# Altium footprint library CustomCase.PcbLib: 411 footprints (part 14 of 26)
Each footprint in its own frame and in the unit in brackets; x right, y up, seen from the top. Pads: shape width x height; smd on the part's side, far side on the other; paste and mask are expansions set on the pad; w line width, h text height; cw(c..) or ccw(c..) is an arc to the next point about the centre after c.
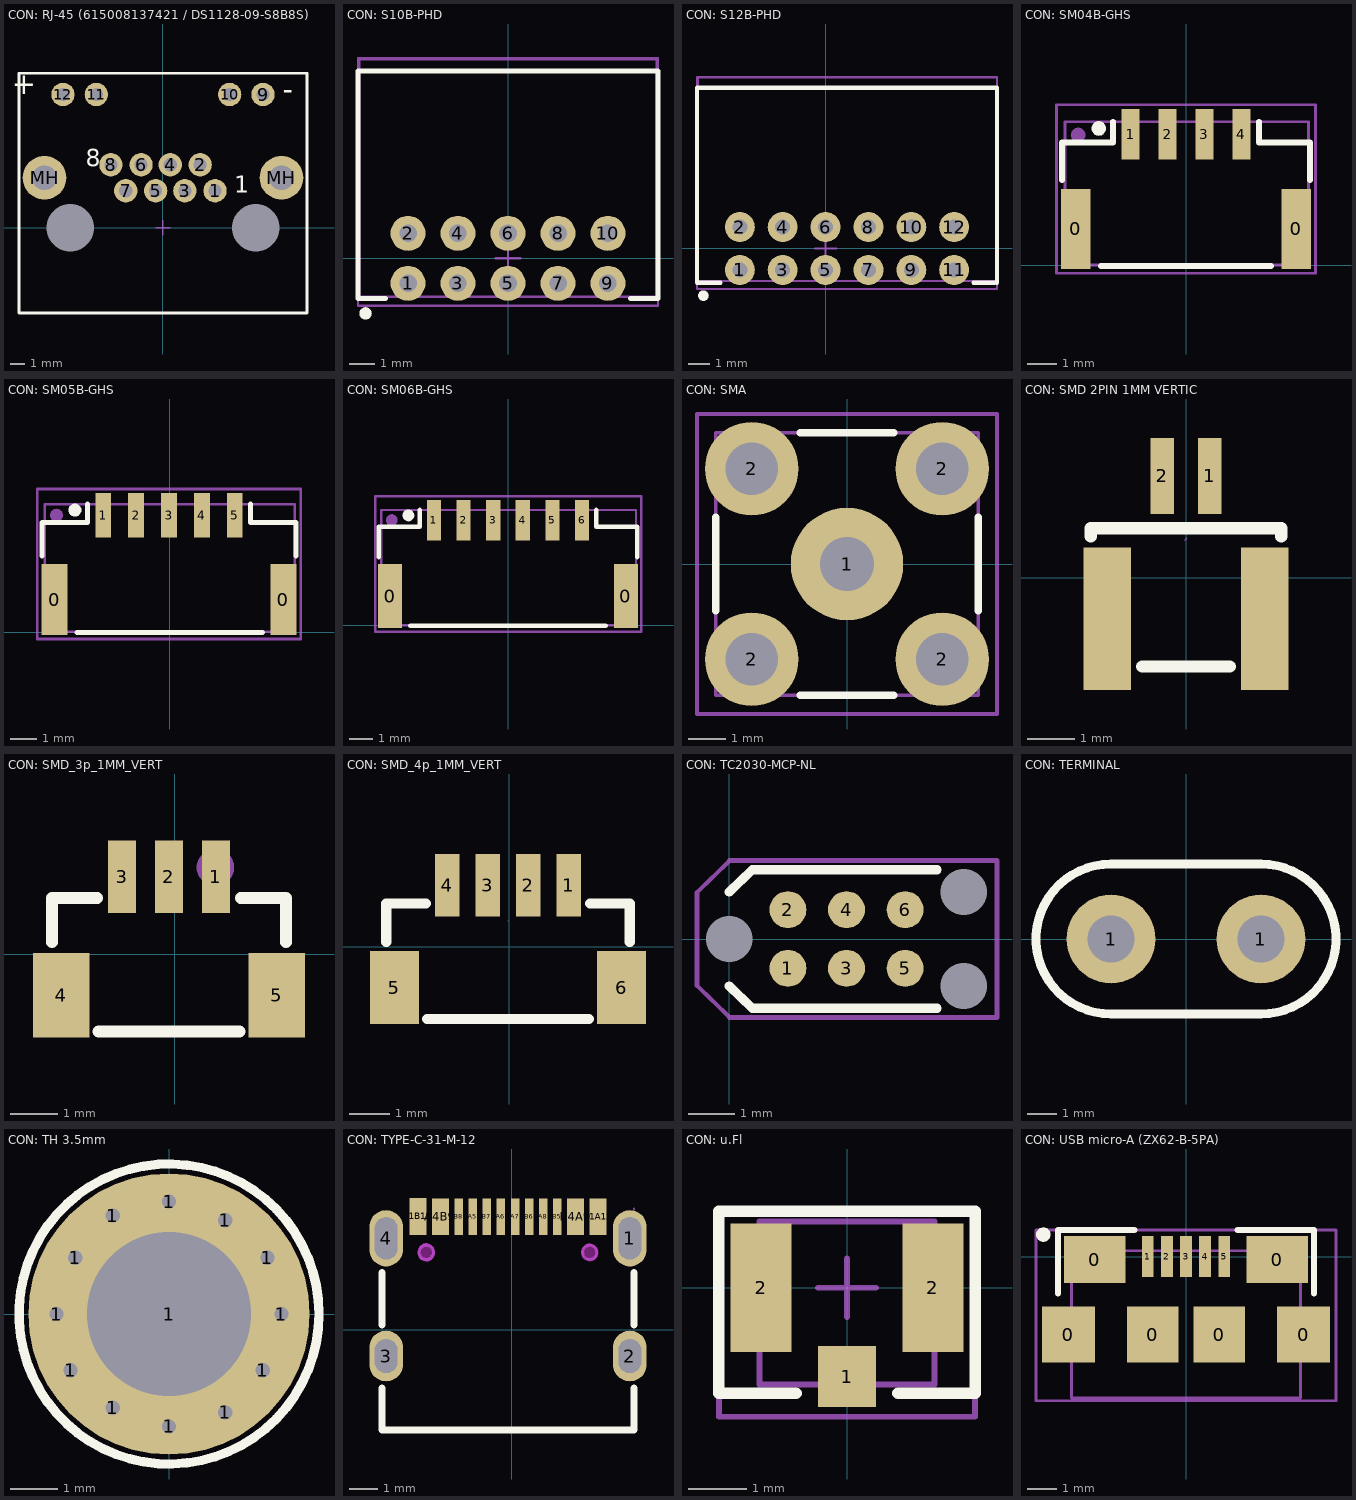
[diagram p13: the footprints below, top view; thin cyan lines are the x and y axes]

## CON: RJ-45 (615008137421 / DS1128-09-S8B8S) [mm]
pads (16):
  round 1.6 hole 0.9: 1(3.57,2.54) 2(2.55,4.32) 3(1.503,2.54) 4(0.501,4.32) 5(-0.501,2.54) 6(-1.503,4.32) 7(-2.55,2.54) 8(-3.57,4.32) 9(6.86,9.14) 10(4.57,9.14) 11(-4.57,9.14) 12(-6.86,9.14)
  round 3 hole 1.7: MH(-8.125,3.43) MH(8.125,3.43)
  round 0 hole 3.25: MH(-6.35,0) MH(6.35,0)
Top Overlay:
  lines w0.2: -9.875,-5.85 -9.875,10.6 9.875,10.6 9.875,-5.85 -9.875,-5.85
  text "1" at 4.9,2 h2
  text "8" at -5.3,3.8 h2
  text "-" at 8.2,8.3 h2.5
  text "+" at -8.7,8.668 h2.5
Top Assy:
  lines w0.1: -9.875,-5.85 -9.875,10.6 9.875,10.6 9.875,-5.85 -9.875,-5.85
Size Area:
  lines w0.1: -0.501,0 0.501,0 ; 0,-0.5 0,0.5 ; -9.875,-5.85 -9.875,10.6 9.875,10.6 9.875,-5.85 -9.875,-5.85
3D body "615008137421_Download_STP_615008137421_rev1.stp": height 15.23, standoff -3.21, extent -9.875,-5.855 9.875,10.595

## CON: S10B-PHD [mm]
pads (11):
  round 1.4 hole 0.7: 1(-4,-1) 2(-4,1) 3(-2,-1) 4(-2,1) 5(0,-1) 6(0,1) 7(2,-1) 8(2,1) 9(4,-1) 10(4,1)
  round 0.5 on Top Overlay: ""(-5.7,-2.2)
Top Overlay:
  lines w0.2: -4.9,-1.6 -5.9,-1.6 -6,-1.6 -6,7.5 6,7.5 6,-1.6 5.9,-1.6 4.9,-1.6
Top Assy:
  lines w0.1: -5.95,-1.525 5.95,-1.525 5.95,7.975 -5.95,7.975 -5.95,-1.525
Size Area:
  lines w0.1: -0.5,0 0.5,0 ; 0,-0.5 0,0.5 ; -6,-1.9 6,-1.9 6,8 -6,8 -6,-1.9
3D body "S10B-PHD.STEP": height 5, standoff -3, extent -5.95,-1.525 5.95,7.975

## CON: S12B-PHD [mm]
pads (13):
  round 1.4 hole 0.7: 1(-4,-1) 2(-4,1) 3(-2,-1) 4(-2,1) 5(0,-1) 6(0,1) 7(2,-1) 8(2,1) 9(4,-1) 10(4,1) 11(6,-1) 12(6,1)
  round 0.5 on Top Overlay: ""(-5.7,-2.2)
Top Overlay:
  lines w0.2: -4.9,-1.6 -5.9,-1.6 -6,-1.6 -6,7.5 8,7.5 8,-1.6 ; 6.9,-1.6 7.9,-1.6
Top Assy:
  lines w0.1: -5.95,-1.525 8,-1.525 8,7.975 -5.95,7.975 -5.95,-1.525
Size Area:
  lines w0.1: -0.5,0 0.5,0 ; 0,-0.5 0,0.5 ; -6,-1.9 -6,8 8,8 8,-1.9 -6,-1.9
3D body "S12B-PHDSS.STEP": height 5, standoff 0, extent -5.95,-1.525 7.95,7.975

## CON: SM04B-GHS [mm]
pads (8):
  rect 1x2.7 smd: 0(-3.725,1.225) 0(3.725,1.225)
  rect 0.6x1.7 smd: 1(-1.875,4.425) 2(-0.625,4.425) 3(0.625,4.425) 4(1.875,4.425)
  round 0.5 on Mech13: ""(-3.65,4.4)
  round 0.5 on Top Overlay: ""(-2.95,4.625)
Top Overlay:
  lines w0.2: -4.2,2.875 -4.2,4.15 -2.475,4.15 -2.475,4.85 ; -2.875,-0.025 2.875,-0.025 ; 2.475,4.85 2.475,4.15 4.2,4.15 4.2,2.875
Top Assy:
  lines w0.1: -4.1,0 -4.1,4.85 4.15,4.85 4.15,0 -4.1,0
Size Area:
  lines w0.1: -4.375,-0.275 4.375,-0.275 4.375,5.425 -4.375,5.425 -4.375,-0.275
3D body "SM04B-GHS-TB.STEP": height 4.32, standoff -0.03, extent -4.1,0 4.15,4.85

## CON: SM05B-GHS [mm]
pads (9):
  rect 1x2.7 smd: 0(-4.375,1.25) 0(4.325,1.25)
  rect 0.6x1.7 smd: 1(-2.525,4.45) 2(-1.275,4.45) 3(-0.025,4.45) 4(1.225,4.45) 5(2.475,4.45)
  round 0.5 on Mech1: ""(-4.3,4.45)
  round 0.5 on Top Overlay: ""(-3.6,4.65)
Top Overlay:
  lines w0.2: -4.85,2.9 -4.85,4.175 -3.125,4.175 -3.125,4.875 ; -3.525,0 3.525,0 ; 3.075,4.875 3.075,4.175 4.8,4.175 4.8,2.9
Top Assy:
  lines w0.1: -4.75,0.025 4.75,0.025 4.75,4.875 -4.75,4.875 -4.75,0.025
Size Area:
  lines w0.1: -5.025,-0.25 4.975,-0.25 4.975,5.45 -5.025,5.45 -5.025,-0.25
3D body "SM05B-GHS-TB.STEP": height 4.35, standoff 0, extent -4.75,0.025 4.75,4.875

## CON: SM06B-GHS [mm]
pads (10):
  rect 1x2.7 smd: 0(-4.975,1.225) 0(4.975,1.225)
  rect 0.6x1.7 smd: 1(-3.125,4.425) 2(-1.875,4.425) 3(-0.625,4.425) 4(0.625,4.425) 5(1.875,4.425) 6(3.125,4.425)
  round 0.5 on Mech1: ""(-4.9,4.425)
  round 0.5 on Top Overlay: ""(-4.2,4.625)
Top Overlay:
  lines w0.2: -5.45,2.875 -5.45,4.15 -3.725,4.15 -3.725,4.85 ; -4.125,-0.025 4.125,-0.025 ; 3.725,4.85 3.725,4.15 5.45,4.15 5.45,2.875
Top Assy:
  lines w0.1: -5.35,0 -5.35,4.85 5.4,4.85 5.4,0 -5.35,0
Size Area:
  lines w0.1: -5.6,-0.275 -5.6,5.425 5.625,5.425 5.625,-0.275 -5.6,-0.275
3D body "SM06B-GHS-TB.STEP": height 4.33, standoff -0.02, extent -5.35,0 5.4,4.85

## CON: SMA [mm]
pads (5):
  round 3 hole 1.45: 1(0,0)
  round 2.5 hole 1.4: 2(-2.54,-2.54) 2(-2.54,2.54) 2(2.54,-2.54) 2(2.54,2.54)
Top Overlay:
  lines w0.2: -3.5,-1.25 -3.5,1.25 ; -1.25,-3.5 1.25,-3.5 ; -1.25,3.5 1.25,3.5 ; 3.5,-1.25 3.5,1.25
Top Assy:
  lines w0.1: -3.5,-3.5 3.5,-3.5 3.5,3.5 -3.5,3.5 -3.5,-3.5
Size Area:
  lines w0.1: -0.5,0 0.5,0 ; 0,-0.5 0,0.5 ; -4,-4 -4,4 4,4 4,-4 -4,-4
3D body "SMA_connector.STEP": height 9.53, standoff -3.94, extent -3.5,-3.5 3.5,3.5

## CON: SMD 2PIN 1MM VERTIC [mm]
pads (4):
  rect 0.5x1.6 smd: 1(0.491,2.135) 2(-0.509,2.135)
  rect 1x3 smd: ""(-1.659,-0.865) ""(1.641,-0.865)
Top Overlay:
  lines w0.254: -2.009,0.866 -2.009,1.035 1.991,1.035 1.991,0.866 ; -0.928,-1.864 0.91,-1.864
Size Area:
  lines w0.003: -0.034,0.78 0.016,0.831

## CON: SMD_3p_1MM_VERT [mm]
pads (5):
  rect 0.6x1.55 smd: 1(0.877,1.649) 2(-0.123,1.649) 3(-1.123,1.649)
  rect 1.2x1.8 smd: 4(-2.423,-0.876) 5(2.177,-0.876)
Top Overlay:
  lines w0.254: -2.623,0.255 -2.623,1.199 -1.654,1.199 ; -1.623,-1.651 1.377,-1.651 ; 1.409,1.199 2.377,1.199 2.377,0.255
Size Area:
  circle w0.4: c0.868,1.851 r0.2
3D body "5.STEP": height 4.86, standoff 0, extent -2.623,-1.651 2.377,1.849

## CON: SMD_4p_1MM_VERT [mm]
pads (6):
  rect 0.6x1.55 smd: 1(1.471,1.522) 2(0.471,1.522) 3(-0.529,1.522) 4(-1.529,1.522)
  rect 1.2x1.8 smd: 5(-2.829,-1.003) 6(2.771,-1.003)
Top Overlay:
  lines w0.254: -3.029,0.128 -3.029,1.072 -2.06,1.072 ; -2.029,-1.778 1.971,-1.778 ; 2.002,1.072 2.971,1.072 2.971,0.128
Size Area:
  lines w0.003: -0.029,0.65 -0.029,0.65
3D body "6.STEP": height 4.86, standoff 0, extent -3.029,-1.8 2.971,1.7

## CON: TC2030-MCP-NL [mm]
pads (9):
  round 0.8 smd: 1(1.27,-0.635) 2(1.27,0.635) 3(2.54,-0.635) 4(2.54,0.635) 5(3.81,-0.635) 6(3.81,0.635)
  round 0.8 hole 1: ""(0,0) ""(5.08,-1.016) ""(5.08,1.016)
Top Overlay:
  lines w0.2: 0,-1.016 0.5,-1.5 1,-1.5 4.5,-1.5 ; 0,1.016 0.5,1.5 1,1.5 4.5,1.5
Size Area:
  lines w0.1: -0.7,-1.008 -0.7,1.008 0.003,1.7 5.8,1.7 5.8,-1.7 0.003,-1.7 -0.7,-1.008

## CON: TERMINAL [mm]
pads (2):
  round 3 hole 1.6: 1(-2.54,0) 1(2.54,0)
Top Overlay:
  lines w0.3: -2.54,-2.54 cw(c-2.54,0) -2.54,2.54 2.54,2.54 cw(c2.54,0) 2.54,-2.54 -2.54,-2.54
3D body "1217861-1.stp": height 10.5, standoff -3.52, extent -3.962,-1.543 3.962,1.543

## CON: TH 3.5mm [mm]
pads (13):
  round 0.7 hole 0.3: 1(-2.4,0) 1(-2.1,-1.2) 1(-2,1.2) 1(-1.2,-2) 1(-1.2,2.1) 1(0,-2.4) 1(0,2.4) 1(1.2,-2.1) 1(1.2,2) 1(2,-1.2) 1(2.1,1.2) 1(2.4,0)
  round 6 hole 3.5: 1(0,0)
Top Overlay:
  circle w0.2: c0,0 r3.2

## CON: TYPE-C-31-M-12 [mm]
pads (16):
  oval 1.2x2 hole 0.8 slot 1.5 at 90 deg paste-2539.97 mask+0.051: 1(4.191,3.24) 4(-4.459,3.24)
  oval 1.2x1.8 hole 0.8 slot 1.2 at 90 deg copper offset 0,0 paste-2539.97 mask+0.051: 2(4.191,-0.94) 3(-4.459,-0.94)
  rect 0.6x1.3 smd paste-100 mask+0.051: A1B12(-3.334,4.014) A4B9(-2.534,4.008) B1A12(3.066,4.008) B4A9(2.266,4.008)
  rect 0.3x1.3 smd paste-100 mask+0.051: A5(-1.384,4.008) A6(-0.384,4.008) A7(0.116,4.008) A8(1.116,4.008) B5(1.616,4.008) B6(0.616,4.008) B7(-0.884,4.008) B8(-1.884,4.008)
Top Overlay:
  lines w0.254: -4.603,-2.079 -4.603,-3.56 4.337,-3.56 4.337,-2.078 ; -4.603,0.159 -4.603,2.021 ; 4.337,0.158 4.337,2.022
Top Paste:
  drawing of 16 lines, arcs and shapes, not listed
Keep-Out Layer:
  board cut-out: -2.734,2.74 -2.734,2.68 -2.78,2.57 -2.864,2.486 -2.974,2.44 -3.094,2.44 -3.204,2.486 -3.288,2.57 -3.334,2.68 -3.334,2.74 -3.334,2.8 -3.288,2.91 -3.204,2.994 -3.094,3.04 -2.974,3.04 -2.864,2.994 -2.78,2.91 -2.734,2.8
  board cut-out: 3.066,2.74 3.066,2.68 3.02,2.57 2.936,2.486 2.826,2.44 2.706,2.44 2.596,2.486 2.512,2.57 2.466,2.68 2.466,2.74 2.466,2.8 2.512,2.91 2.596,2.994 2.706,3.04 2.826,3.04 2.936,2.994 3.02,2.91 3.066,2.8
Keep-Out Layer:
  circle w0.003: c-3.034,2.74 r0.3
  circle w0.003: c2.766,2.74 r0.3
  region: -2.734,2.74 -2.743,2.668 -2.768,2.6 -2.809,2.541 -2.864,2.493 -2.928,2.459 -2.998,2.442 -3.07,2.442 -3.14,2.459 -3.204,2.493 -3.258,2.541 -3.3,2.6 -3.325,2.668 -3.334,2.74 -3.325,2.812 -3.3,2.879 -3.258,2.939 -3.204,2.987 -3.14,3.02 -3.07,3.038 -2.998,3.038 -2.928,3.02 -2.864,2.987 -2.809,2.939 -2.768,2.879 -2.743,2.812
  region: 3.066,2.74 3.057,2.668 3.032,2.6 2.99,2.541 2.936,2.493 2.872,2.459 2.802,2.442 2.73,2.442 2.66,2.459 2.595,2.493 2.541,2.541 2.5,2.6 2.475,2.668 2.466,2.74 2.475,2.812 2.5,2.879 2.541,2.939 2.595,2.987 2.66,3.02 2.73,3.038 2.802,3.038 2.872,3.02 2.936,2.987 2.99,2.939 3.032,2.879 3.057,2.812
Outside border:
  circle w0.003: c-3.034,2.74 r0.3
Outside border (Mech5):
  circle w0.1: c2.766,2.74 r0.251
  circle w0.1: c-3.033,2.741 r0.251
Mechanical 11:
  region: 4.371,4.29 4.371,4.278 4.353,4.26 4.329,4.26 4.311,4.278 4.311,4.29 4.311,4.303 4.329,4.32 4.353,4.32 4.371,4.303
3D body "HRO  TYPE-C-31-M-12.step": height 3.21, standoff -1, extent -4.604,-3.56 4.336,4.34

## CON: u.Fl [mm]
height 1.5
pads (3):
  rect 1x1.05 smd: 1(0,-1.525)
  rect 1.05x2.2 smd: 2(-1.475,0) 2(1.475,0)
Top Overlay:
  lines w0.2: -0.875,-1.813 -2.2,-1.813 -2.2,1.312 2.2,1.312 2.2,-1.813 0.875,-1.813
Top Assy:
  lines w0.1: -1.5,-1.663 -1.5,1.137 1.5,1.137 1.5,-1.663 -1.5,-1.663
Size Area:
  lines w0.1: -0.5,0 0.5,0 ; 0,-0.5 0,0.5 ; -2.2,-2.213 2.2,-2.213 2.2,1.312 -2.2,1.312 -2.2,-2.213
3D body "IPX.step": height 1.27, standoff -0.01, extent -1.5,-1.712 1.5,1.138

## CON: USB micro-A (ZX62-B-5PA) [mm]
height 5
pads (12):
  rect 1.8x1.9 smd: 0(-4,-2.65) 0(4,-2.65)
  rect 2.1x1.6 smd: 0(-3.1,-0.1) 0(3.1,-0.1)
  rect 1.75x1.9 smd: 0(-1.125,-2.65) 0(1.125,-2.65)
  rect 0.4x1.4 smd: 1(-1.3,0) 2(-0.65,0) 3(0,0) 4(0.65,0) 5(1.3,0)
  round 0.5 on Top Overlay: ""(-4.85,0.75)
Top Overlay:
  lines w0.2: -4.35,-1.25 -4.35,0.9 -1.75,0.9 ; 1.75,0.9 4.35,0.9 4.35,-1.25
Top Assy:
  lines w0.1: -3.9,-4.8 3.9,-4.8 3.9,0.2 -3.9,0.2 -3.9,-4.8
Size Area:
  lines w0.1: -5.1,-4.9 5.1,-4.9 5.1,0.9 -5.1,0.9 -5.1,-4.9
3D body "User Library-micro usb SMD.STEP": height 2.68, standoff -0.02, extent -3.9,-4.8 3.9,0.2